# EAGLE library part IC_ADC_AD9288 (library dp_devices.v6)
8-Bit, 40/80/100 MSPS Dual A/D Converter
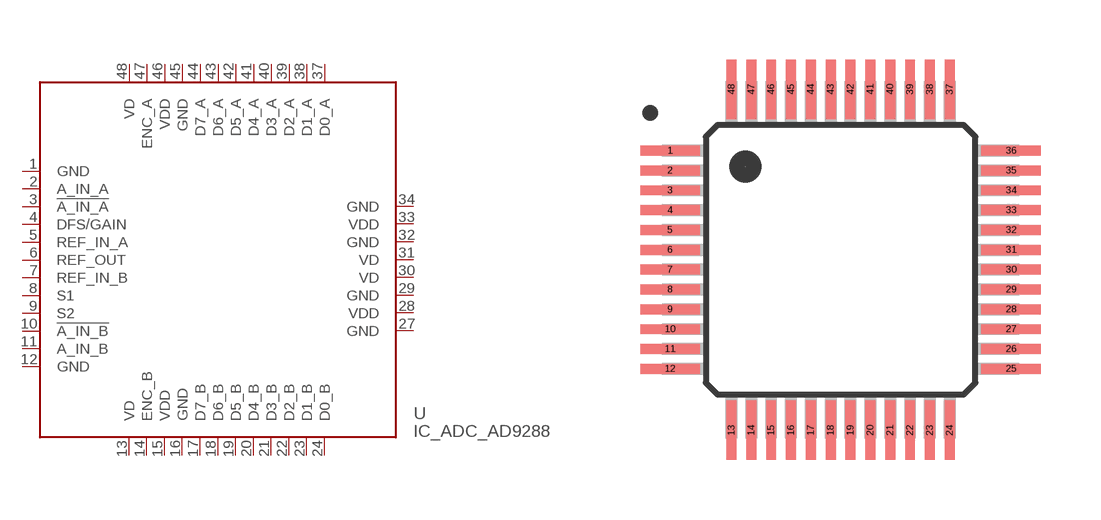
[diagram p204: symbol with the pads of LQFP48; footprint LQFP48]

Designator prefix U

## IC_ADC_AD9288  [LQFP48]
1  GND  pwr
2  A_IN_A  in
3  !A_IN_A  in
4  DFS/GAIN
5  REF_IN_A  in
6  REF_OUT
7  REF_IN_B  in
8  S1
9  S2
10  !A_IN_B  in
11  A_IN_B  in
12  GND  pwr
13  VD  pwr
14  ENC_B
15  VDD  pwr
16  GND  pwr
17  D7_B  out
18  D6_B  out
19  D5_B  out
20  D4_B  out
21  D3_B  out
22  D2_B  out
23  D1_B  out
24  D0_B  out
27  GND  pwr
28  VDD  pwr
29  GND  pwr
30  VD  pwr
31  VD  pwr
32  GND  pwr
33  VDD  pwr
34  GND  pwr
37  D0_A  out
38  D1_A  out
39  D2_A  out
40  D3_A  out
41  D4_A  out
42  D5_A  out
43  D6_A  out
44  D7_A  out
45  GND  pwr
46  VDD  pwr
47  ENC_A
48  VD  pwr

## Footprint LQFP48 (pad centres in mm)
smd 1.5 x 0.25: 1 -4.3,2.75; 2 -4.3,2.25; 3 -4.3,1.75; 4 -4.3,1.25; 5 -4.3,0.75; 6 -4.3,0.25; 7 -4.3,-0.25; 8 -4.3,-0.75; 9 -4.3,-1.25; 10 -4.3,-1.75; 11 -4.3,-2.25; 12 -4.3,-2.75; 25 4.3,-2.75; 26 4.3,-2.25; 27 4.3,-1.75; 28 4.3,-1.25; 29 4.3,-0.75; 30 4.3,-0.25; 31 4.3,0.25; 32 4.3,0.75; 33 4.3,1.25; 34 4.3,1.75; 35 4.3,2.25; 36 4.3,2.75
smd 0.25 x 1.5: 13 -2.75,-4.3; 14 -2.25,-4.3; 15 -1.75,-4.3; 16 -1.25,-4.3; 17 -0.75,-4.3; 18 -0.25,-4.3; 19 0.25,-4.3; 20 0.75,-4.3; 21 1.25,-4.3; 22 1.75,-4.3; 23 2.25,-4.3; 24 2.75,-4.3; 37 2.75,4.3; 38 2.25,4.3; 39 1.75,4.3; 40 1.25,4.3; 41 0.75,4.3; 42 0.25,4.3; 43 -0.25,4.3; 44 -0.75,4.3; 45 -1.25,4.3; 46 -1.75,4.3; 47 -2.25,4.3; 48 -2.75,4.3